# Altium integrated library C1608X7R1C105K.IntLib: 1 symbol
Pins are listed as number, name and electrical type; pins without a type are passive.

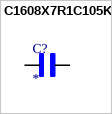
[diagram p0: symbol C1608X7R1C105K]

## C1608X7R1C105K
designator C?
1 ÂµF Â±10% 16V Ceramic Capacitor X7R 0603 (1608 Metric); MF: TDK; MP: C1608X7R1C105K; SnapEDA_Link: https://www.snapeda.com/parts/C1608X7R1C105K/TDK/view-part/?ref=snap; Package: 0603 TDK; Value: *; Check_prices: https://www.snapeda.com/parts/C1608X7R1C105K/TDK/view-part/?ref=eda
footprint CAPC1608X95
pins: 1, 2